# Altium footprint library Resistores_PTH_RES-50.PcbLib: 17 footprints (part 2 of 2)
Each footprint in its own frame and in the unit in brackets; x right, y up, seen from the top. Pads: shape width x height; smd on the part's side, far side on the other; paste and mask are expansions set on the pad; w line width, h text height; cw(c..) or ccw(c..) is an arc to the next point about the centre after c.
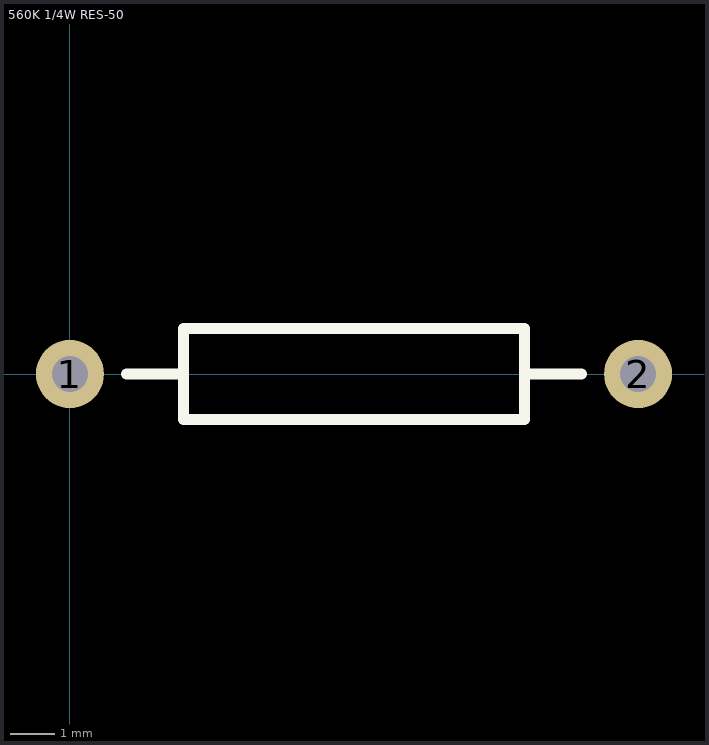
[diagram p1: the footprint, top view; thin cyan lines are the x and y axes]

## 560K 1/4W RES-50 [mil]
pads (2):
  round 60 hole 31.5 unplated: 1(0,0) 2(500,0)
Top Overlay:
  lines w10: 50,0 100,0 ; 450,0 400,0 ; 100,0 100,-40 400,-40 400,0 ; 100,0 100,30 100,40 400,40 400,0
3D body "560k.STEP": height 172.24, standoff -196.85, extent -14.77,-73.81 514.76,73.82